# Altium footprint library 104031-0811_MOL.PcbLib: 1 footprints
Each footprint in its own frame and in the unit in brackets; x right, y up, seen from the top. Pads: shape width x height; smd on the part's side, far side on the other; paste and mask are expansions set on the pad; w line width, h text height; cw(c..) or ccw(c..) is an arc to the next point about the centre after c.
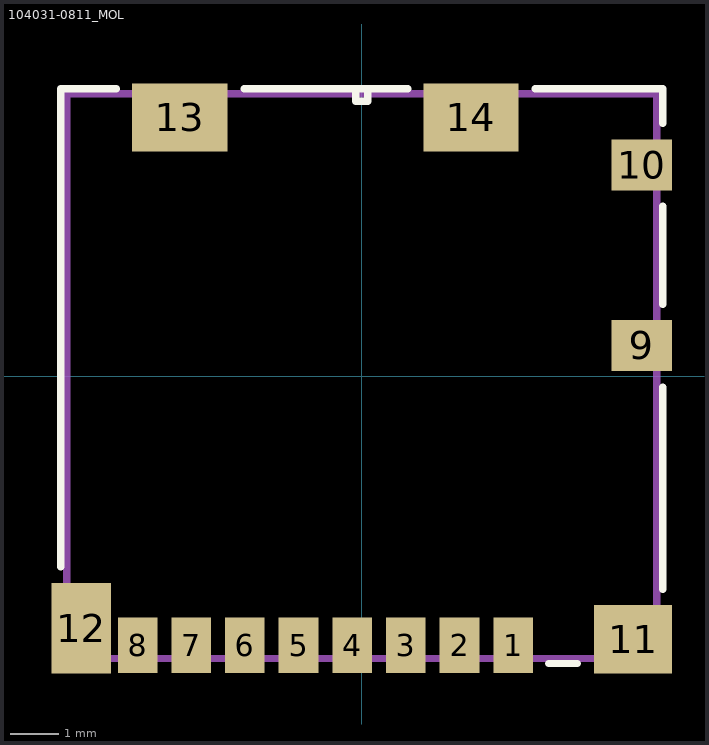
[diagram p0: the footprint, top view; thin cyan lines are the x and y axes]

## 104031-0811_MOL [mil]
pads (14):
  rect 32x45 smd: 1(122.24,-217.38) 2(78.94,-217.38) 3(35.63,-217.38) 4(-7.68,-217.38) 5(-50.98,-217.38) 6(-94.29,-217.38) 7(-137.6,-217.38) 8(-180.91,-217.38)
  rect 49x41 smd: 9(225.98,24.74) 10(225.98,170.41)
  rect 63x55 smd: 11(219.09,-212.46)
  rect 48x73 smd: 12(-226.57,-203.6)
  rect 77x55 smd: 13(-146.85,208.8) 14(88.19,208.8)
Top Overlay:
  lines w6: -243,-154 -243,232 -198,232 ; -95,232 -5,232 ; 37,232 5,232 ; 140,232 243,232 243,204 ; 151,-232 174,-232 ; 243,-172 243,-9 ; 243,58 243,137 ; -5,232 -5,222 5,222 5,232 ; -5,232 5,232
Assembly Top:
  lines w6: -238,-228 238,-228 238,228 -238,228 -238,-228
3D body "1040310811.stp": height 59.15, standoff -0.91, extent -237.38,-228.67 234.66,225.08